# Altium schematic symbol library UCP.SchLib: 378 symbols (part 6 of 14)
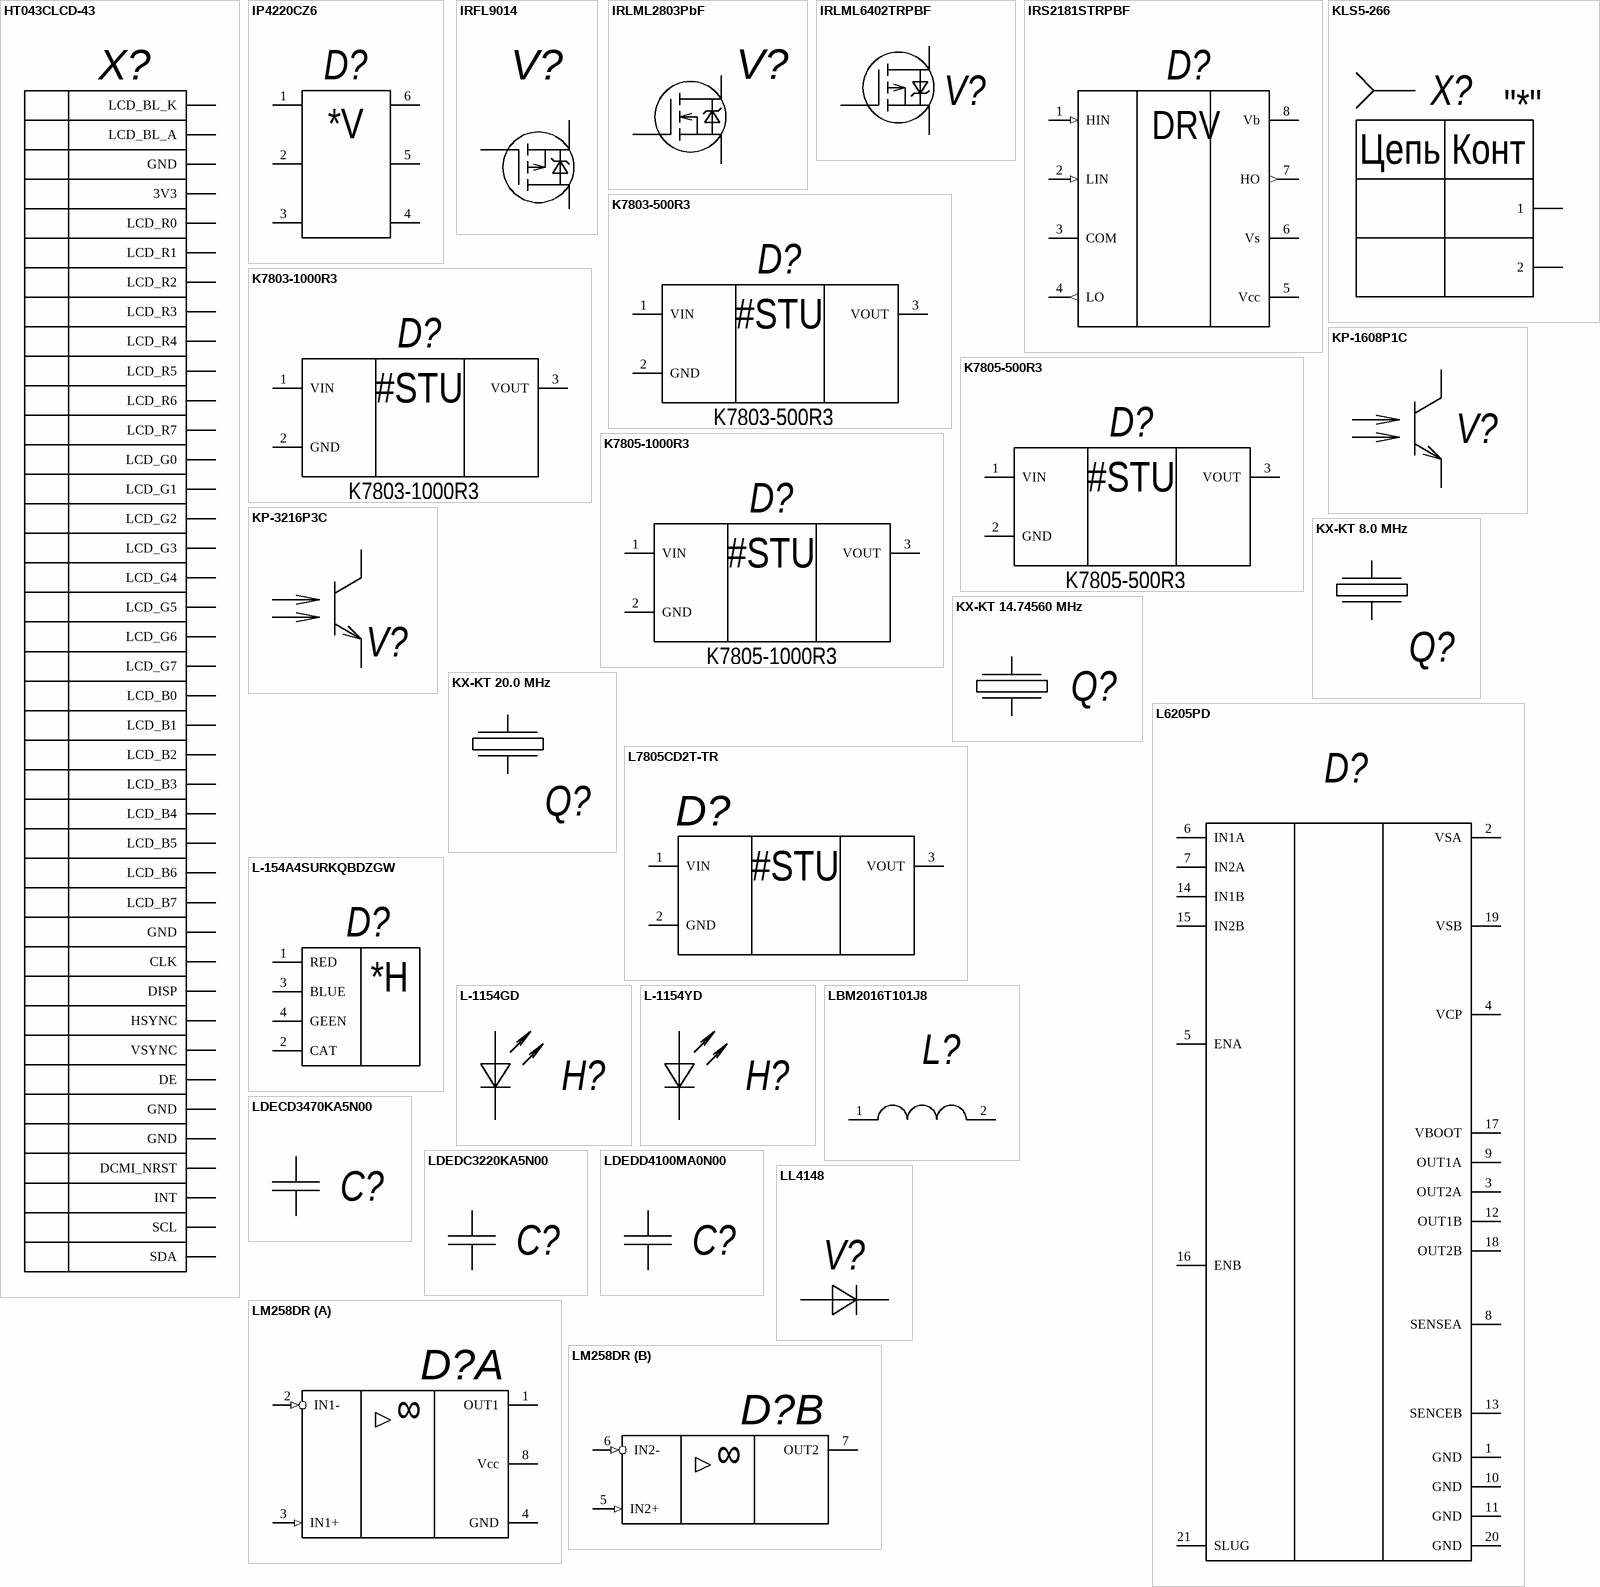
[diagram p29: symbols HT043CLCD-43 to LM258DR]

## IP4220CZ6
designator D?, comment IP4220CZ6,125  (value not drawn)
Dual USB 2.0 integrated ESD protection; Type: Микросхема; Value: IP4220; Supplier 1: Digi-Key; Supplier Part Number 1: 1727-3578-1-ND; Case/Package: SOT-23-6; Mount: SMT
footprint SOP6P95_290X275X110L40X32N (Small Outline Pkg (SOP), 0.95 mm pitch; 6 pin, 2.90 mm L X 1.50 mm W X 1.10 mm H body)
pins: 1 R1, 2 R2, 3 R3, 4 R4, 5 R5, 6 R6
text: *V

## IRFL9014
designator V?  (value not drawn)
Trans MOSFET P-CH 60V 1.8A 4-Pin(3+Tab) SOT-223 T/R; Manufacturer 1: Vishay Siliconix; Manufacturer Part Number 1: IRFL9014TRPBF; Power Dissipation: 2W; Rise Time: 63ns; Drain to Source Breakdown Voltage: -60V; Rds On Max: 500mR; Input Capacitance: 270pF; Gate to Source Voltage (Vgs): 20V; Fall Time: 31ns; Turn-Off Delay Time: 9.6ns; Number of Elements: 1; Turn-On Delay Time: 11ns; Threshold Voltage: -2V; Supplier 1: Digi-Key; RoHS: Yes; Category: MOSFETs; Stock 1: 12; Pricing 1: 1=1,01000, 10=0,89000, 100=0,68210, 500=0,53922, 1000=0,43138 (USD); Mount: SMT; Case/Package: SOT-223; Number of Pins: 4; Weight: 0.008826oz; Min Operating Temperature: -55°C; Max Operating Temperature: 150°C; Packaging: Tape and Reel; Continuous Drain Current (ID): 1.8A; Drain to Source Voltage (Vdss): 60V; Max Power Dissipation: 2W; Package Quantity: 2500; Drain to Source Resistance: 500mR; Number of Channels: 1; On-State Resistance: 500mR; Length: 6.7mm; Width: 3.7mm; Height: 1.45mm; Radiation Hardening: No; Lead Free: Lead Free; REACH SVHC: Unknown; ComponentLink1URL: https://datasheet.ciiva.com/932/sihfl901-932465.pdf?src-supplier=Digi-Key; ComponentLink1Description: https://datasheet.ciiva.com/932/sihfl901-932465.pdf?src-supplier=Digi-Key; ComponentLink2URL: https://datasheet.ciiva.com/4439/sihfl901-107496-4439233.pdf?src-supplier=Mouser; ComponentLink2Description: https://datasheet.ciiva.com/4439/sihfl901-107496-4439233.pdf?src-supplier=Mouser; ComponentLink3URL: https://datasheet.ciiva.com/22652/1724908-22652241.pdf?src-supplier=Element14; ComponentLink3Description: https://datasheet.ciiva.com/22652/1724908-22652241.pdf?src-supplier=Element14; ComponentLink4URL: https://datasheet.ciiva.com/17077/irfl9014trpbf-17077594.pdf?src-supplier=Allied+Electronics; ComponentLink4Description: https://datasheet.ciiva.com/17077/irfl9014trpbf-17077594.pdf?src-supplier=Allied+Electronics; ComponentLink5URL: https://datasheet.ciiva.com/26789/irfl9014trpbf-26789752.pdf?src-supplier=IIIC; ComponentLink5Description: https://datasheet.ciiva.com/26789/irfl9014trpbf-26789752.pdf?src-supplier=IIIC; ComponentLink6URL: https://datasheet.ciiva.com/932/sihfl901-932466.pdf?src-supplier=Digi-Key; ComponentLink6Description: https://datasheet.ciiva.com/932/sihfl901-932466.pdf?src-supplier=Digi-Key; ComponentLink7URL: https://datasheet.ciiva.com/932/sihfl901-932467.pdf?src-supplier=Digi-Key; ComponentLink7Description: https://datasheet.ciiva.com/932/sihfl901-932467.pdf?src-supplier=Digi-Key; ComponentLink8URL: https://datasheet.ciiva.com/26147/sihfl901-26147669.pdf?src-supplier=Avnet+Europe; ComponentLink8Description: https://datasheet.ciiva.com/26147/sihfl901-26147669.pdf?src-supplier=Avnet+Europe; ComponentLink9URL: https://datasheet.ciiva.com/8116/sihfl901-8116525.pdf?src-supplier=Avnet; ComponentLink9Description: https://datasheet.ciiva.com/8116/sihfl901-8116525.pdf?src-supplier=Avnet; ComponentLink10URL: https://datasheet.ciiva.com/16383/sihfl901-16383149.pdf?src-supplier=Future+Electronics; ComponentLink10Description: https://datasheet.ciiva.com/16383/sihfl901-16383149.pdf?src-supplier=Future+Electronics; Supplier Part Number 1: IRFL9014PBFCT-ND; Type: Транзистор; Value: IRFL9014
footprint SOT223-4P230_700X180L92X75N (Small Outline Transistor (SOT223), 2.30 mm pitch; 4 pin, 6.50 mm L X 3.50 mm W X 1.80 mm H body)
pins: 1 G, 2 D, 3 S, 4 D

## IRLML2803PbF
designator V?  (value not drawn)
Trans Mosfet P-ch 30V 1.1A 3-PIN SOT-23 T/r / Mosfet P-ch 30V 1.1A SSOT3; Manufacturer 1: ON Semiconductor / Fairchild; Manufacturer Part Number 1: NDS356AP; Max Power Dissipation: 460mW; Power Dissipation: 500mW; Nominal Vgs: -2V; Rds On Max: 200mR; Input Capacitance: 280pF; Rise Time: 17ns; Dual Supply Voltage: -30V; Turn-Off Delay Time: 53ns; Turn-On Delay Time: 8ns; Number of Elements: 1; Element Configuration: Single; Gate to Source Voltage (Vgs): 20V; On-State Resistance: 300mR; Current Rating: -1.1A; Supplier 1: Newark; RoHS: Yes; Category: MOSFETs; Stock 1: 56; Pricing 1: 1=0,68800, 10=0,58900, 100=0,43900, 500=0,34500 (USD); Mount: SMT; Case/Package: SOT-23-3; Number of Pins: 3; Weight: 0.03g; Min Operating Temperature: -55°C; Max Operating Temperature: 150°C; Drain to Source Voltage (Vdss): 30V; Continuous Drain Current (ID): 1.1A; Packaging: Tape and Reel; Package Quantity: 1; Fall Time: 17ns; Drain to Source Resistance: 200mR; Drain to Source Breakdown Voltage: -30V; Termination: SMD/SMT; Voltage Rating (DC): -30V; Width: 3.05mm; Radiation Hardening: No; REACH SVHC: No SVHC; RoHS Compliant: Yes; Lead Free: Lead Free; ComponentLink1URL: https://datasheet.ciiva.com/34301/1031124-34301896.pdf?src-supplier=Jameco; ComponentLink1Description: https://datasheet.ciiva.com/34301/1031124-34301896.pdf?src-supplier=Jameco; ComponentLink2URL: https://datasheet.ciiva.com/34301/1031167-34301897.pdf?src-supplier=Jameco; ComponentLink2Description: https://datasheet.ciiva.com/34301/1031167-34301897.pdf?src-supplier=Jameco; ComponentLink3URL: https://datasheet.ciiva.com/6383/nds356ap-6383345.pdf?src-supplier=Digi-Key; ComponentLink3Description: https://datasheet.ciiva.com/6383/nds356ap-6383345.pdf?src-supplier=Digi-Key; ComponentLink4URL: https://datasheet.ciiva.com/11176/nds356ap-11176040.pdf?src-supplier=Avnet; ComponentLink4Description: https://datasheet.ciiva.com/11176/nds356ap-11176040.pdf?src-supplier=Avnet; ComponentLink5URL: https://datasheet.ciiva.com/26140/nds356ap-26140220.pdf?src-supplier=Avnet+Europe; ComponentLink5Description: https://datasheet.ciiva.com/26140/nds356ap-26140220.pdf?src-supplier=Avnet+Europe; ComponentLink6URL: https://datasheet.ciiva.com/6383/nds356ap-6383349.pdf?src-supplier=Digi-Key; ComponentLink6Description: https://datasheet.ciiva.com/6383/nds356ap-6383349.pdf?src-supplier=Digi-Key; ComponentLink7URL: https://datasheet.ciiva.com/6383/nds356ap-6383351.pdf?src-supplier=Digi-Key; ComponentLink7Description: https://datasheet.ciiva.com/6383/nds356ap-6383351.pdf?src-supplier=Digi-Key; Type: Транзистор; Value: IRLML2803
footprint SOT23-3P95_240X110L25X60N (Small Outline Transistor (SOT23), 0.95 mm pitch; 3 pin, 2.90 mm L X 1.30 mm W X 1.10 mm H body)
footprint SOT23-3P95_240X110L30X43N (Small Outline Transistor (SOT23), 0.95 mm pitch; 3 pin, 2.90 mm L X 1.30 mm W X 1.10 mm H body)
pins: 1 G, 2 S, 3 D

## IRLML6402TRPBF
designator V?  (value not drawn)
P-Channel MOSFET; Supplier 1: RSComponents; Supplier Part Number 1: 301322; Case/Package: SOT-23-3; Mount: SMT; Type: Транзистор; Value: IRLML6402
footprint SOT23-3P95_240X110L25X60N (Small Outline Transistor (SOT23), 0.95 mm pitch; 3 pin, 2.90 mm L X 1.30 mm W X 1.10 mm H body)
footprint SOT23-3P95_240X110L30X43N (Small Outline Transistor (SOT23), 0.95 mm pitch; 3 pin, 2.90 mm L X 1.30 mm W X 1.10 mm H body)
pins: 1 G, 2 S, 3 D

## IRS2181STRPBF
designator D?  (value not drawn)
INTERNATIONAL RECTIFIER   IRS2181STRPBF   MOSFET DRIVER, HIGH/LOW-SIDE, SOIC-8; Number of Outputs: 2; Max Supply Voltage: 20V; Min Supply Voltage: 10V; Max Power Dissipation: 625mW; Turn-On Delay Time: 35ns; Propagation Delay: 330ns; Rise Time: 60ns; Max Output Current: 2.3A; Output Current: 1.9A; Max Supply Current: 240uA; Type: Микросхема; Supplier 1: Allied Electronics; Manufacturer 1: International Rectifier; Manufacturer Part Number 1: IRS2181STRPBF; RoHS: Yes; Category: Gate Drivers; Mount: SMT; Case/Package: SOIC-8-150; Number of Pins: 8; Weight: 0.019048oz; Min Operating Temperature: -40°C; Max Operating Temperature: 125°C; Package Quantity: 1; Packaging: Tape and Reel; Number of Drivers: 2; Fall Time: 35ns; Turn-Off Delay Time: 35ns; Power Dissipation: 625mW; Series: -; Operating Supply Current: 240uA; Output Voltage: 10V; Radiation Hardening: No; Lead Free: Lead Free; RoHS Compliant: Yes; REACH SVHC: No SVHC; ComponentLink1URL: https://datasheet.ciiva.com/15110/getdatasheetpartid-224396-15110064.pdf?src-supplier=Verical; ComponentLink1Description: https://datasheet.ciiva.com/15110/getdatasheetpartid-224396-15110064.pdf?src-supplier=Verical; ComponentLink2URL: https://datasheet.ciiva.com/16219/irs2181-16219484.pdf?src-supplier=Future+Electronics; ComponentLink2Description: https://datasheet.ciiva.com/16219/irs2181-16219484.pdf?src-supplier=Future+Electronics; Supplier Part Number 1: 70019117; Value: IRS2181
footprint SOIC8P127_490X600X175L83X42N (Small Outline IC (SOIC), 1.27 mm pitch; 8 pin, 4.905 mm L X 3.90 mm W X 1.75 mm H body)
footprint SOIC8P127_490X600X175L65X42N (Small Outline IC (SOIC), 1.27 mm pitch; 8 pin, 4.905 mm L X 3.90 mm W X 1.75 mm H body)
pins: 1 HIN (in) "Logic input for high-side gate driver output (HO), in phase", 2 LIN (in) "Logic input for low-side gate driver output (LO), in phase", 3 COM (power) "Low-side return", 4 LO (out) "Low-side gate drive output", 5 Vcc (power) "Low-side and logic fixed supply", 6 Vs "High-side floating supply return", 7 HO (out) "High-side gate drive output", 8 Vb "High-side floating supply"
text: DRV

## K7803-500R3
designator D?
Voltage Regulators - Switching Vout = 3.3V Iout = 500mA / Vin = 6-36V; Manufacturer 1: MORNSUN; Type: Микросхема; Value: K7803; Supplier 1: Digi-Key; Supplier Part Number 1: 2725-K7803-500R3-ND; Manufacturer Part Number 1: K7803-500R3; RoHS: Yes; Category: Board Mount Modules; Stock 1: 40434; Pricing 1: 1=2,26000, 5=2,22800, 10=2,19400, 25=2,13760, 50=2,07000, 100=2,01380, 250=1,95752, 500=1,81126 (USD); RoHS Compliant: Yes; Case/Package: SIP-3; Mount: THT
footprint MORNSUN_K78XX-500R3 (3 pin, L = 11.60 mm, W = 7.55mm, H = 10.16 mm)
pins: 1 VIN (power) "Input voltage pin for the regulator", 2 GND (power), 3 VOUT (power) "Output voltage pin for the regulator"
text: #STU

## K7803-1000R3
designator D?
Voltage Regulators - Switching Vout = 3.3V Iout = 1000mA / Vin = 6-36V; Manufacturer 1: MORNSUN; Type: Микросхема; Value: K7803; Supplier 1: RSComponents; Supplier Part Number 1: 1934012; Manufacturer Part Number 1: K7803-1000R3; RoHS: Yes; Category: Voltage Regulators - Switching; RoHS Compliant: Yes; Case/Package: SIP-3; Mount: THT
footprint MORNSUN_K78XX-1000R3 (3 pin, L = 11.50 mm, W = 9.00 mm, H = 17.50 mm)
pins: 1 VIN (power) "Input voltage pin for the regulator", 2 GND (power), 3 VOUT (power) "Output voltage pin for the regulator"
text: #STU

## K7805-500R3
designator D?
Voltage Regulators - Switching Vout = 5.0V Iout = 500mA / Vin = 6-36V; Manufacturer 1: MORNSUN; Type: Микросхема; Value: K7806; Supplier 1: Digi-Key; Supplier Part Number 1: 2725-K7805-500R3-ND; Manufacturer Part Number 1: K7805-500R3; RoHS: Yes; Category: Board Mount Modules; Stock 1: 67341; Pricing 1: 1=2,26000, 5=2,22800, 10=2,19400, 25=2,13760, 50=2,07000, 100=2,01380, 250=1,95752, 500=1,81126 (USD); RoHS Compliant: Yes; Case/Package: SIP-3; Mount: THT
footprint MORNSUN_K78XX-500R3 (3 pin, L = 11.60 mm, W = 7.55mm, H = 10.16 mm)
pins: 1 VIN (power) "Input voltage pin for the regulator", 2 GND (power), 3 VOUT (power) "Output voltage pin for the regulator"
text: #STU

## K7805-1000R3
designator D?
Voltage Regulators - Switching Vout = 5V Iout = 1000mA / Vin = 6-36V; Manufacturer 1: MORNSUN; Type: Микросхема; Value: K7804; Supplier 1: RSComponents; Supplier Part Number 1: 1934014; Manufacturer Part Number 1: K7805-1000R3; RoHS: Yes; Category: Voltage Regulators - Switching; RoHS Compliant: Yes; Case/Package: SIP-3; Mount: THT
footprint MORNSUN_K78XX-1000R3 (3 pin, L = 11.50 mm, W = 9.00 mm, H = 17.50 mm)
pins: 1 VIN (power) "Input voltage pin for the regulator", 2 GND (power), 3 VOUT (power) "Output voltage pin for the regulator"
text: #STU

## KLS5-266
designator X?  Marck-2: "*"  (hidden comment: KLS5-266)
PCB Fuse Clip For Fuse 5.2×20mm; Marck-1: *; Supplier 1: Digi-Key; Supplier Part Number 1: 486-2019-ND; Case/Package: DIP-2; Mount: THT; Type: 0; Value: KLS5-266
footprint ZH266
pins: 1, 2
text: Цепь; Конт

## KP-1608P1C
designator V?  (value not drawn)
Описание свойств компонента; Case/Package: 0805; Mount: SMT; Type: Фототранзистор; Value: 1608P1C
footprint KP-1608P1C (LED, Chip; 2.00 mm L X 1.25 mm W X 1.10 mm H body)
pins: 1 E, 2 C

## KP-3216P3C
designator V?  (value not drawn)
KINGBRIGHT         KP-3216P3C            PHOTOTRANSISTOR, 1206, 940NM; Viewing Angle: 120°; Polarity: NPN; Supplier 1: Newark; Supplier 2: Farnell; Supplier Part Number 1: 66W1934; Supplier Part Number 2: 2290437; Manufacturer 1: Kingbright; Manufacturer Part Number 1: KP-3216P3C; RoHS: Yes; Category: Uncategorized; Stock 1: 562; Pricing 1: 5=0,59700, 10=0,42200, 100=0,25100, 500=0,19300, 1000=0,15600, 2500=0,13700, 10000=0,13200, 25000=0,11500 (USD); Case/Package: 1206; Number of Pins: 2; Wavelength: 940nm; REACH SVHC: No SVHC; RoHS Compliant: Yes; ComponentLink1URL: https://datasheet.ciiva.com/22662/1683586-22662764.pdf?src-supplier=Element14; ComponentLink1Description: https://datasheet.ciiva.com/22662/1683586-22662764.pdf?src-supplier=Element14; Mount: SMT; Type: Фототранзистор; Value: 3216P3C
footprint KP-3216P3C (Phototransistor, Chip; 3.10 mm L X 1.60 mm W X 1.1 mm H body)
pins: 1 E, 2 C

## KX-KT 8.0 MHz
designator Q?, comment 12.87885  (value not drawn)
Quartz Crystal; Type: Резонатор кварцевый; Value: 8.0MHz; Supplier 1: Newark; Supplier Part Number 1: 56AC7469; Case/Package: HC-49S (SMD-2); Mount: SMT
footprint XTAL1140X450X420D1270L424X94N (Crystal; 11.40 mm L X 4.50 mm W X 4.20 mm H body)
pins: 1, 2

## KX-KT 14.74560 MHz
designator Q?  (value not drawn)
Quartz Crystal; Type: Резонатор кварцевый; Supplier 1: Digi-Key; Supplier Part Number 1: 535-10218-1-ND; Case/Package: HC-49S (SMD-2); Mount: SMT; Value: 14.74560MHz
footprint XTAL1140X450X420D1270L424X94N (Crystal; 11.40 mm L X 4.50 mm W X 4.20 mm H body)
pins: 1, 2

## KX-KT 20.0 MHz
designator Q?, comment 12.88107  (value not drawn)
Quartz Crystal; Type: Резонатор кварцевый; Value: 20.0MHz; Supplier 1: Digi-Key; Supplier Part Number 1: 535-10860-1-ND; Case/Package: HC-49S (SMD-2); Mount: SMT
footprint XTAL1140X450X420D1270L424X94N (Crystal; 11.40 mm L X 4.50 mm W X 4.20 mm H body)
pins: 1, 2

## L6205PD
designator D?  (value not drawn)
Full Bridge Motor Driver 48V 20-Pin PowerSO Tube / IC MOTOR DRIVER PAR 20POWERSO; Manufacturer 1: STMicroelectronics; Min Supply Voltage: 8V; Max Supply Voltage: 52V; Number of Outputs: 4; Output Current: 2.8A; Max Output Current: 5.6A; On-State Resistance: 300mR; Operating Supply Current: 10mA; Switching Frequency: 100kHz; Number of Channels: 2; Motor Type: Brushed; Rise Time: 250ns; Release Time: 550ns; Type: Микросхема; Value: L6205; Supplier 1: RSComponents; Supplier Part Number 1: 7140644; Manufacturer Part Number 1: L6205PD; RoHS: Yes; Category: Motor Drivers; Stock 1: 7; Pricing 1: 1=11,39100, 10=10,31500, 25=9,84500, 100=8,15000, 250=7,43700 (USD); Mount: SMT; Case/Package: PowerSO-20; Number of Pins: 20; Min Operating Temperature: -40°C; Max Operating Temperature: 150°C; Operating Supply Voltage: 48V; Packaging: Rail/Tube; Package Quantity: 31; Output Current per Channel: 2.8A; Max Collector Current: 2.8A; Collector Emitter Voltage (VCEO): 52V; Series: -; Output Voltage: 52V; Length: 16mm; Width: 11.1mm; Height: 3.3mm; Radiation Hardening: No; REACH SVHC: No SVHC; Lead Free: Lead Free; RoHS Compliant: Yes; ComponentLink1URL: https://datasheet.ciiva.com/15109/getdatasheetpartid-144488-15109394.pdf?src-supplier=Verical; ComponentLink1Description: https://datasheet.ciiva.com/15109/getdatasheetpartid-144488-15109394.pdf?src-supplier=Verical; ComponentLink2URL: https://datasheet.ciiva.com/14121/pgl6205-data-e-14121341.pdf?src-supplier=Distrelec; ComponentLink2Description: https://datasheet.ciiva.com/14121/pgl6205-data-e-14121341.pdf?src-supplier=Distrelec; ComponentLink3URL: https://datasheet.ciiva.com/26880/l6205pd-26880193.pdf?src-supplier=IIIC; ComponentLink3Description: https://datasheet.ciiva.com/26880/l6205pd-26880193.pdf?src-supplier=IIIC; ComponentLink4URL: https://datasheet.ciiva.com/1957/cd00002345-1957107.pdf?src-supplier=Digi-Key; ComponentLink4Description: https://datasheet.ciiva.com/1957/cd00002345-1957107.pdf?src-supplier=Digi-Key; ComponentLink5URL: https://datasheet.ciiva.com/4895/cd00002345-4895884.pdf?src-supplier=Mouser; ComponentLink5Description: https://datasheet.ciiva.com/4895/cd00002345-4895884.pdf?src-supplier=Mouser; ComponentLink6URL: https://datasheet.ciiva.com/16375/cd00002345-16375548.pdf?src-supplier=Future+Electronics; ComponentLink6Description: https://datasheet.ciiva.com/16375/cd00002345-16375548.pdf?src-supplier=Future+Electronics; ComponentLink7URL: https://datasheet.ciiva.com/22628/1700279-22628893.pdf?src-supplier=Element14; ComponentLink7Description: https://datasheet.ciiva.com/22628/1700279-22628893.pdf?src-supplier=Element14; ComponentLink8URL: https://datasheet.ciiva.com/25904/cd00002345-25904718.pdf?src-supplier=Avnet+Europe; ComponentLink8Description: https://datasheet.ciiva.com/25904/cd00002345-25904718.pdf?src-supplier=Avnet+Europe
footprint PowerSO20 (Small Outline IC (SOIC), 1.27 mm pitch; 20 pin, 12.80 mm L X 7.50 mm W X 2.65 mm H body)
pins: 1 GND (power) "Назначение вывода", 2 VSA (power) "Назначение вывода", 3 OUT2A "Назначение вывода", 4 VCP "Назначение вывода", 5 ENA "Назначение вывода", 6 IN1A "Назначение вывода", 7 IN2A "Назначение вывода", 8 SENSEA "Назначение вывода", 9 OUT1A "Назначение вывода", 10 GND (power) "Назначение вывода", 11 GND (power) "Назначение вывода", 12 OUT1B "Назначение вывода", 13 SENCEB "Назначение вывода", 14 IN1B "Назначение вывода", 15 IN2B "Назначение вывода", 16 ENB "Назначение вывода", 17 VBOOT (power) "Назначение вывода", 18 OUT2B "Назначение вывода", 19 VSB "Назначение вывода", 20 GND "Назначение вывода", 21 SLUG "Назначение вывода"

## L7805CD2T-TR
designator D?  (value not drawn)
Standard Regulator Pos 5V 1.5A 3-Pin(2+Tab) D2PAK T/R / IC REG LDO 5V 1.5A D2PAK; Type: Микросхема; Value: 7805; Case/Package: TO-263; Mount: SMT
footprint DPAK3P508_1524X482L179X74T741X1041M_num_1 (D2PAK, 5.08 mm pitch; 3 pin, 9.015 mm L X 10.16 mm W X 4.83 mm H body)
pins: 1 VIN (power) "Input voltage pin for the regulator", 2 GND (power), 3 VOUT (power) "Output voltage pin for the regulator"
text: #STU

## L-154A4SURKQBDZGW
designator D?  (value not drawn)
RGB LED; Type: Светодиод; Value: L-154; Supplier 1: Newark; Supplier Part Number 1: 66W1973; Case/Package: DIP-4; Mount: THT
footprint L-154A4SURKQBDZGW
pins: 1 RED "Назначение вывода", 2 CAT "Назначение вывода", 3 BLUE "Назначение вывода", 4 GEEN "Назначение вывода"
text: *H

## L-1154GD
designator H?  (value not drawn)
LED Lamp 3mm Pure Green; Value: зелёный; Case/Package: DIP-2; Mount: THT; Type: Светодиод
footprint LEDRD254W52D400H1250 (Radial (LED); 2.54 mm C X 4.00 mm Dia X 12.50 mm H body)
pins: A, C

## L-1154YD
designator H?  (value not drawn)
LED Lamp 3mm Pure Yellow; Value: жёлтый; Case/Package: DIP-2; Mount: THT; Type: Светодиод
footprint LEDRD254W52D400H1250 (Radial (LED); 2.54 mm C X 4.00 mm Dia X 12.50 mm H body)
pins: A, C

## LBM2016T101J8
designator L?  (value not drawn)
Описание свойств компонента; Type: 0; Supplier 1: Mouser; Supplier Part Number 1: 963-LBM2016T101J8; Case/Package: 0806; Mount: SMT; Value: LBM2016
pins: 1 "Назначение вывода", 2 "Назначение вывода"

## LDECD3470KA5N00
designator C?  (value not drawn)
470 nF ±10% 50 Vdc  PEN Film Capacitor; Manufacturer 1: KEMET; Description 1: Cap Film 0.47uF 50V PEN 10% (6 X 5 X 2.4mm) Stacked 125C Automotive T/R; Dielectric Material: Polyester; Capacitance: 470nF; Voltage Rating: 50V; Voltage Rating (AC): 40V; Dissipation Factor: 0.8%; Life (Hours): 2000Hour; Type: Конденсатор; Value: 470n; ComponentLink1URL: https://datasheet.ciiva.com/17238/datasheetpn-dedc3220ka5n00-17238768.pdf?src-supplier=Avnet+Europe; ComponentLink1Description: https://datasheet.ciiva.com/17238/datasheetpn-dedc3220ka5n00-17238768.pdf?src-supplier=Avnet+Europe; ComponentLink2URL: https://datasheet.ciiva.com/46436/1848868-46436183.pdf?src-supplier=Element14; ComponentLink2Description: https://datasheet.ciiva.com/46436/1848868-46436183.pdf?src-supplier=Element14; Supplier 1: Newark; Supplier Part Number 1: 95M5290; Manufacturer Part Number 1: LDECD3470KA5N00; RoHS: Yes; Category: Film Capacitors; Stock 1: 2700; Pricing 1: 1=1,98000, 25=1,48000, 50=1,22000, 100=0,95100, 250=0,90200, 500=0,85200 (USD); Mount: SMT; Case/Package: 2220; Number of Pins: 2; Case Code (Metric): 5750; Case Code (Imperial): 2220; Min Operating Temperature: -55°C; Max Operating Temperature: 125°C; Tolerance: 10%; Package Quantity: 1; Voltage Rating (DC): 50V; Packaging: Tape and Reel; Termination: SMD/SMT; Series: LDE; Voltage: 50V; Construction: Flat; Length: 6mm; Width: 5.1mm; Height: 2.4mm; Depth: 5mm; Height - Seated (Max): 0.094inch; Radiation Hardening: No; RoHS Compliant: Yes; REACH SVHC: No SVHC; ComponentLink3URL: http://uk.rs-online.com/webdocs/13da/0900766b813da2dd.pdf?src-supplier=RSComponents; ComponentLink3Description: http://uk.rs-online.com/webdocs/13da/0900766b813da2dd.pdf?src-supplier=RSComponents; ComponentLink4URL: http://www.mouser.com/ds/2/212/KEM_F3078_LDE-1103670.pdf?src-supplier=Mouser; ComponentLink4Description: http://www.mouser.com/ds/2/212/KEM_F3078_LDE-1103670.pdf?src-supplier=Mouser; ComponentLink5URL: http://components.arrow.com/part/dataview/0323_04081861?src-supplier=Arrow+Europe; ComponentLink5Description: http://components.arrow.com/part/dataview/0323_04081861?src-supplier=Arrow+Europe; ComponentLink6URL: https://www.alliedelec.com/m/d/40677f2e966276fa94026d325366fb79.pdf?src-supplier=Allied+Electronics; ComponentLink6Description: https://www.alliedelec.com/m/d/40677f2e966276fa94026d325366fb79.pdf?src-supplier=Allied+Electronics; ComponentLink7URL: http://www.farnell.com/datasheets/1959647.pdf?src-supplier=Farnell; ComponentLink7Description: http://www.farnell.com/datasheets/1959647.pdf?src-supplier=Farnell; ComponentLink8URL: http://www.arcotronics.com/download/smd.php?id=1&src-supplier=Element14; ComponentLink8Description: http://www.arcotronics.com/download/smd.php?id=1&src-supplier=Element14; ComponentLink9URL: https://search.kemet.com/component-edge/download/specsheet/DECD3470KA5N00.pdf?src-supplier=Digi-Key; ComponentLink9Description: https://search.kemet.com/component-edge/download/specsheet/DECD3470KA5N00.pdf?src-supplier=Digi-Key; ComponentLink10URL: http://capacitoredge.kemet.com/capedge2/DataSheet?pn=LDECD3470KA5N00&src-supplier=Avnet+Europe; ComponentLink10Description: http://capacitoredge.kemet.com/capedge2/DataSheet?pn=LDECD3470KA5N00&src-supplier=Avnet+Europe; ComponentLink11URL: http://www.arcotronics.com/download/smd.php?id=1&src-supplier=Farnell; ComponentLink11Description: http://www.arcotronics.com/download/smd.php?id=1&src-supplier=Farnell; ComponentLink12URL: http://www.farnell.com/datasheets/1959647.pdf?src-supplier=Element14; ComponentLink12Description: http://www.farnell.com/datasheets/1959647.pdf?src-supplier=Element14; ComponentLink13URL: http://capacitoredge.kemet.com/capedge2/DataSheet?pn=LDECD3470KA5N00&src-supplier=Avnet; ComponentLink13Description: http://capacitoredge.kemet.com/capedge2/DataSheet?pn=LDECD3470KA5N00&src-supplier=Avnet; ComponentLink14URL: https://api.kemet.com/component-edge/download/datasheet/LDECD3470KA5N00.pdf?src-supplier=Digi-Key; ComponentLink14Description: https://api.kemet.com/component-edge/download/datasheet/LDECD3470KA5N00.pdf?src-supplier=Digi-Key
footprint CAPC600X500X240L50 (Capacitor, Chip; 6.00 mm L X 5.00 mm W X 2.4 mm H body)
footprint CAPC600X500X240L50_KEMET (Capacitor, Chip; 6.00 mm L X 5.00 mm W X 2.4 mm H body)
pins: 1, 2

## LDEDC3220KA5N00
designator C?  (value not drawn)
220 nF ±10% 63 Vdc  PEN Film Capacitor; Manufacturer 1: KEMET; Description 1: 220nF +/-10% 40 V ac; 63 V dc PEN Film Capacitor LDE; Dielectric Material: Polyethylene; Capacitance: 220nF; Voltage Rating: 63V; Voltage Rating (AC): 40V; Type: Конденсатор; Value: 220n; Supplier 1: Digi-Key; Supplier Part Number 1: 399-11780-1-ND; Manufacturer Part Number 1: LDEDC3220KA5N00; RoHS: Yes; Category: Film Capacitors; Stock 1: 7114; Pricing 1: 1=0,92000, 10=0,70000, 50=0,58140, 100=0,50070, 500=0,38766, 1000=0,33382 (USD); Mount: SMT; Case/Package: 1812; Number of Pins: 2; Case Code (Metric): 4532; Case Code (Imperial): 1812; Min Operating Temperature: -55°C; Max Operating Temperature: 125°C; Tolerance: 10%; Voltage Rating (DC): 63V; Packaging: Tape and Reel; Termination: SMD/SMT; Voltage: 63V; Features: High Temperature; Series: LDE; Construction: Flat; Length: 4.7mm; Width: 0.13inch; Height: 2.4mm; Depth: 3.3mm; Height - Seated (Max): 0.094inch; Radiation Hardening: No; REACH SVHC: No SVHC; RoHS Compliant: Yes; ComponentLink1URL: https://datasheet.ciiva.com/17238/datasheetpn-dedc3220ka5n00-17238768.pdf?src-supplier=Avnet+Europe; ComponentLink1Description: https://datasheet.ciiva.com/17238/datasheetpn-dedc3220ka5n00-17238768.pdf?src-supplier=Avnet+Europe; ComponentLink2URL: https://datasheet.ciiva.com/46436/1848868-46436183.pdf?src-supplier=Element14; ComponentLink2Description: https://datasheet.ciiva.com/46436/1848868-46436183.pdf?src-supplier=Element14
footprint CAPC475X330X240L50 (Capacitor, Chip; 2.00 mm L X 1.25 mm W X 0.95 mm H body)
pins: 1, 2

## LDEDD4100MA0N00
designator C?  (value not drawn)
1 uF ±20% 63 Vdc  PEN Film Capacitor; Manufacturer 1: KEMET; Description 1: Cap Film 1uF 63V PEN 20% (6 X 5 X 4.4mm) Stacked 125C Automotive T/R; Dielectric Material: Polyester; Capacitance: 1uF; Voltage Rating (AC): 40V; Voltage Rating (DC): 63V; Type: Конденсатор; Value: 1u; Supplier 1: Digi-Key; Supplier Part Number 1: 399-11781-1-ND; Manufacturer Part Number 1: LDEDD4100MA0N00; RoHS: Yes; Category: Film Capacitors; Stock 1: 2597; Pricing 1: 1=1,66000, 10=1,34300, 50=1,17220, 100=1,02560, 500=0,78144 (USD); Mount: SMT; Case/Package: 2220; Case Code (Metric): 5750; Case Code (Imperial): 2220; Min Operating Temperature: -55°C; Max Operating Temperature: 125°C; Tolerance: 20%; Packaging: Tape and Reel; Features: High Temperature; Length: 0.236inch; Width: 0.197inch; Height - Seated (Max): 0.173inch; Depth: 5mm; RoHS Compliant: Yes; ComponentLink1URL: http://components.arrow.com/part/dataview/0323_03825373?src-supplier=Arrow+Europe; ComponentLink1Description: http://components.arrow.com/part/dataview/0323_03825373?src-supplier=Arrow+Europe; ComponentLink2URL: http://www.kemet.com/docfinder?Partnumber=LDE&src-supplier=Digi-Key; ComponentLink2Description: http://www.kemet.com/docfinder?Partnumber=LDE&src-supplier=Digi-Key
footprint CAPC600X500X240L50 (Capacitor, Chip; 6.00 mm L X 5.00 mm W X 2.4 mm H body)
footprint CAPC600X500X440L50_KEMET (Capacitor, Chip; 6.00 mm L X 5.00 mm W X 4.4 mm H body)
pins: 1, 2

## LL4148
designator V?  (value not drawn)
Surface-Mount Schottky Barrier Rectifier; Value: 4148; Supplier 1: Digi-Key; Supplier Part Number 1: LL4148FSCT-ND; Case/Package: SOD-80; Mount: SMT; Type: Диод
footprint DIOMELF350X164L52N (Diode, Metal Electrode Leadless Face (MELF); 3.50 mm L X 1.645 mm Dia body)
pins: A, C

## LM258DR
designator D?  (value not drawn)
Dual standard, industrial-grade, operational amplifier 8-SOIC -25 to 85; Manufacturer 1: Texas Instruments; Bandwidth: 1MHz; Min Dual Supply Voltage: 3.5V; Max Dual Supply Voltage: 18V; Voltage Gain: 75.56dB; Dual Supply Voltage: 9V; Nominal Supply Current: 500uA; Common Mode Rejection Ratio: 80dB; Number of Channels: 2; Slew Rate: 3.5V/µs; Max I/O Voltage: 6mV; Input Offset Voltage (Vos): 3mV; Input Bias Current: 200pA; Operating Supply Current: 200uA; Output Current: 30mA; Min Supply Voltage: 3V; Amplifier Type: GENERAL PURPOSE; Supply Current: 1.2mA; Type: Микросхема; Value: LM258; Manufacturer Part Number 1: LM258DR; RoHS: Yes; Category: Amplifiers - Op Amps, Buffer, Instrumentation; Stock 1: 59536; Pricing 1: 2500=0,11900 (USD); Case/Package: SOIC-8-150; Number of Pins: 8; Min Operating Temperature: -40°C; Max Operating Temperature: 85°C; Unity Gain Bandwidth Product: 1MHz; Packaging: Rail/Tube; Package Quantity: 50; Nominal Gain Bandwidth Product: 1MHz; Gain Bandwidth Product: 1MHz; Number of Circuits: 2; Number of Elements: 2; Operating Supply Voltage: 18V; Number of Amplifiers: 2; Max Supply Current: 500uA; Length: 9.81mm; Width: 6.35mm; Height: 4.57mm; Radiation Hardening: No; Lead Free: Lead Free; RoHS Compliant: Yes; REACH SVHC: No SVHC; ComponentLink1URL: https://datasheet.ciiva.com/27051/1063193-27051334.pdf?src-supplier=Jameco; ComponentLink1Description: https://datasheet.ciiva.com/27051/1063193-27051334.pdf?src-supplier=Jameco; ComponentLink2URL: https://datasheet.ciiva.com/7738/1768032-7738657.pdf?src-supplier=Element14; ComponentLink2Description: https://datasheet.ciiva.com/7738/1768032-7738657.pdf?src-supplier=Element14; ComponentLink3URL: https://datasheet.ciiva.com/14151/tl06x-series-eng-tds-14151159.pdf?src-supplier=Distrelec; ComponentLink3Description: https://datasheet.ciiva.com/14151/tl06x-series-eng-tds-14151159.pdf?src-supplier=Distrelec; ComponentLink4URL: https://datasheet.ciiva.com/1797/tl062a-1797198.pdf?src-supplier=Digi-Key; ComponentLink4Description: https://datasheet.ciiva.com/1797/tl062a-1797198.pdf?src-supplier=Digi-Key; Manufacturer 2: Texas Instruments; Manufacturer Part Number 2: TL062ID; Stock 2: 9100; Pricing 2: 1=1,40000, 10=1,25400, 25=1,19000, 100=0,97760, 250=0,91388, 500=0,80762, 1000=0,70175 (USD); Contact Plating: Gold; Max Supply Voltage: 18V; ComponentLink5URL: https://datasheet.ciiva.com/15129/getdatasheetpartid-40375-15129693.pdf?src-supplier=Verical; ComponentLink5Description: https://datasheet.ciiva.com/15129/getdatasheetpartid-40375-15129693.pdf?src-supplier=Verical; ComponentLink6URL: https://datasheet.ciiva.com/1797/tl062a-1797276.pdf?src-supplier=Digi-Key; ComponentLink6Description: https://datasheet.ciiva.com/1797/tl062a-1797276.pdf?src-supplier=Digi-Key; ComponentLink7URL: https://datasheet.ciiva.com/7738/1634178-7738543.pdf?src-supplier=Element14; ComponentLink7Description: https://datasheet.ciiva.com/7738/1634178-7738543.pdf?src-supplier=Element14; ComponentLink8URL: https://datasheet.ciiva.com/2974/tl062-2974181.pdf?src-supplier=Avnet; ComponentLink8Description: https://datasheet.ciiva.com/2974/tl062-2974181.pdf?src-supplier=Avnet; ComponentLink9URL: https://datasheet.ciiva.com/48712/001011491-da-01-en-ic-opamp-jfet-1mhz-du-tl062id-soic-8-tid-48712330.pdf?src-supplier=Conrad; ComponentLink9Description: https://datasheet.ciiva.com/48712/001011491-da-01-en-ic-opamp-jfet-1mhz-du-tl062id-soic-8-tid-48712330.pdf?src-supplier=Conrad; Mount: SMT; Output Current per Channel: 30mA; Series: -; Technology: BIPOLAR; ComponentLink10URL: https://datasheet.ciiva.com/34302/1342934-34302235.pdf?src-supplier=Jameco; ComponentLink10Description: https://datasheet.ciiva.com/34302/1342934-34302235.pdf?src-supplier=Jameco; ComponentLink11URL: https://datasheet.ciiva.com/1795/lm258a-1795505.pdf?src-supplier=Digi-Key; ComponentLink11Description: https://datasheet.ciiva.com/1795/lm258a-1795505.pdf?src-supplier=Digi-Key; ComponentLink12URL: https://datasheet.ciiva.com/1795/lm258a-1795506.pdf?src-supplier=Digi-Key; ComponentLink12Description: https://datasheet.ciiva.com/1795/lm258a-1795506.pdf?src-supplier=Digi-Key; ComponentLink13URL: https://datasheet.ciiva.com/1795/lm258a-1795507.pdf?src-supplier=Digi-Key; ComponentLink13Description: https://datasheet.ciiva.com/1795/lm258a-1795507.pdf?src-supplier=Digi-Key; ComponentLink14URL: https://datasheet.ciiva.com/2973/lm358a-2973285.pdf?src-supplier=Avnet; ComponentLink14Description: https://datasheet.ciiva.com/2973/lm358a-2973285.pdf?src-supplier=Avnet; ComponentLink15URL: https://datasheet.ciiva.com/26223/lm358a-26223035.pdf?src-supplier=Avnet+Europe; ComponentLink15Description: https://datasheet.ciiva.com/26223/lm358a-26223035.pdf?src-supplier=Avnet+Europe; ComponentLink16URL: https://datasheet.ciiva.com/16464/lm358a-16464604.pdf?src-supplier=Avnet+Asia; ComponentLink16Description: https://datasheet.ciiva.com/16464/lm358a-16464604.pdf?src-supplier=Avnet+Asia; ComponentLink17URL: https://datasheet.ciiva.com/48711/001071481-da-01-en-ic-opamp-gp-700khz-du-lm258dr-soic-8-tid-48711227.pdf?src-supplier=Conrad; ComponentLink17Description: https://datasheet.ciiva.com/48711/001071481-da-01-en-ic-opamp-gp-700khz-du-lm258dr-soic-8-tid-48711227.pdf?src-supplier=Conrad; Supplier 1: Mouser; Supplier Part Number 1: 595-LM258DR
footprint SOIC8P127_490X600X175L83X42N (Small Outline IC (SOIC), 1.27 mm pitch; 8 pin, 4.905 mm L X 3.90 mm W X 1.75 mm H body)
footprint SOIC8P127_490X600X175L65X42N (Small Outline IC (SOIC), 1.27 mm pitch; 8 pin, 4.905 mm L X 3.90 mm W X 1.75 mm H body)
part A pins: 1 OUT1 (oc) "Выход 1", 2 IN1- (in), 3 IN1+ (in) "Назначение вывода", 4 GND (power), 8 Vcc (power) "Назначение вывода"
part B pins: 5 IN2+ (in) "Назначение вывода", 6 IN2- (in) "Назначение вывода", 7 OUT2 "Назначение вывода"
part A text: ∞
part B text: ∞

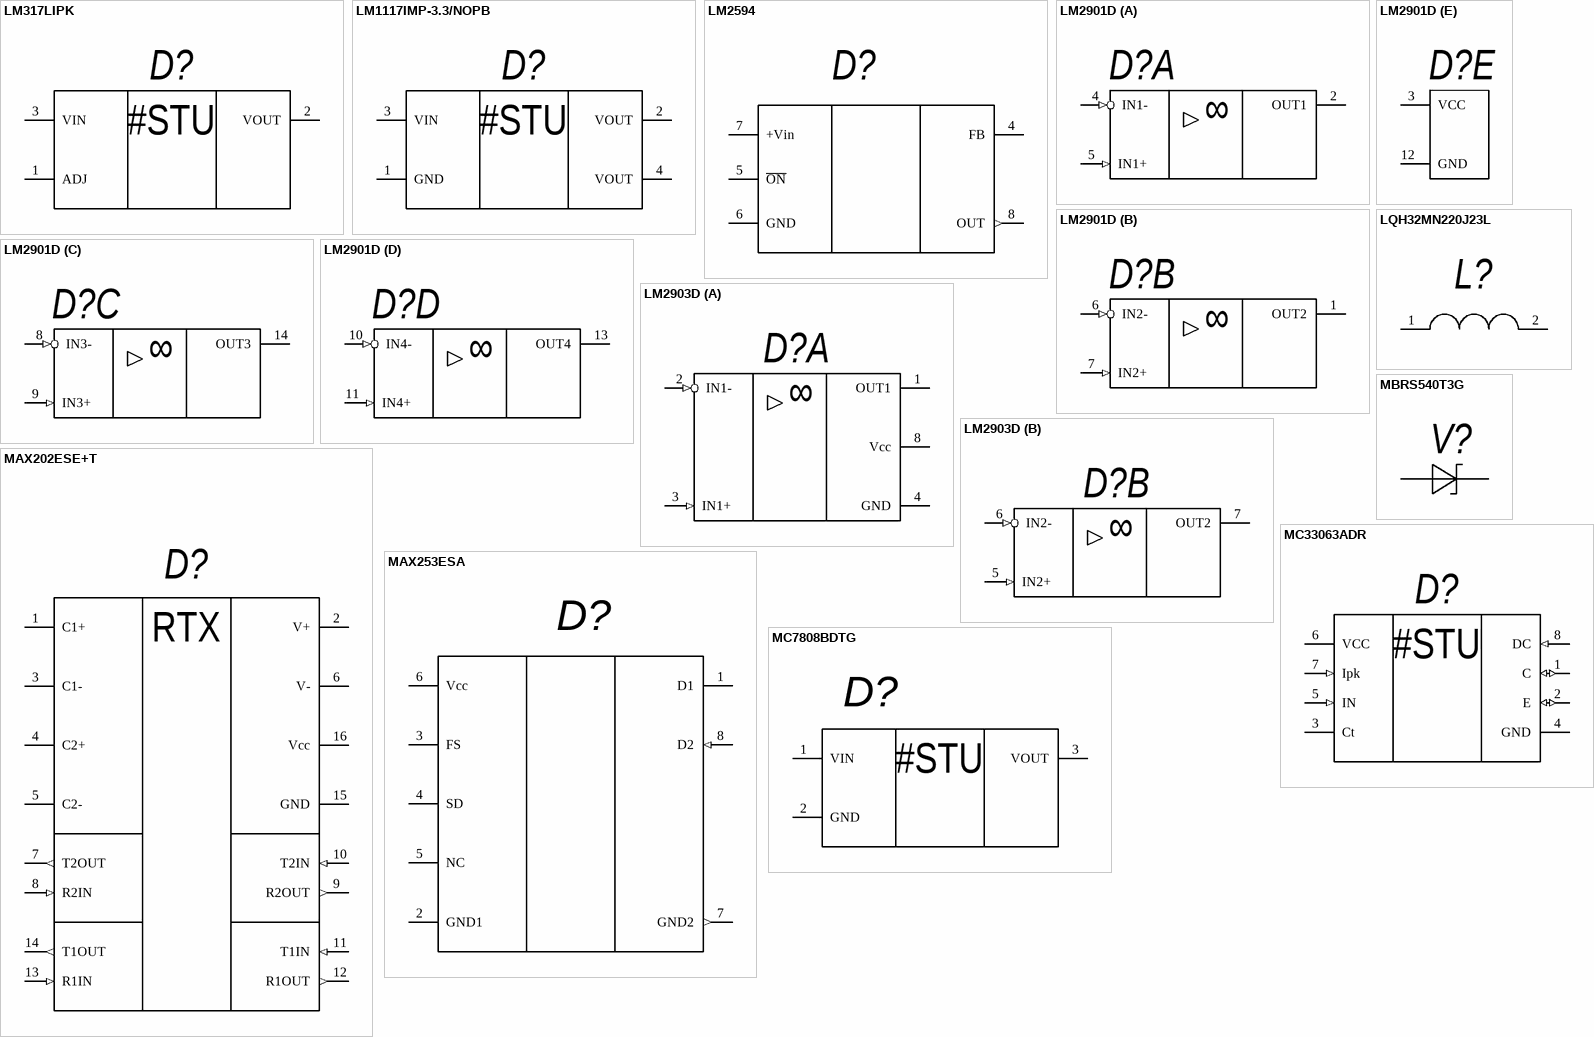
[diagram p15: symbols LM317LIPK to MC33063ADR]

## LM317LIPK
designator D?  (value not drawn)
100-mA, 35-V, adjustable linear voltage regulator 3-SOT-89 -40 to 125; Max Output Current: 100mA; Output Voltage: 32V; Number of Outputs: 1; Max Input Voltage: 35V; Min Input Voltage: 3.7V; Polarity: Positive; Reference Voltage: 1.3V; Power Supply Rejection Ratio (PSRR): 80dB; Quiescent Current: 1.5mA; Min Output Voltage: 1.2V; Type: Микросхема; Value: LM317; Manufacturer 4: Texas Instruments; Manufacturer Part Number 4: LM317LIPK; RoHS: Yes; Category: Voltage Regulators - Linear; Stock 4: 51928; Pricing 4: 1=0,74000, 10=0,65400, 25=0,61440, 100=0,50150, 250=0,46580, 500=0,39644 (USD); Mount: SMT; Case/Package: SOT-89; Number of Pins: 3; Weight: 0.004603oz; Contact Plating: Tin,Matte; Min Operating Temperature: -40°C; Max Operating Temperature: 125°C; Package Quantity: 1; Output Current: 100mA; Packaging: Tape and Reel; Number of Regulators: 1; Output Type: Adjustable; Min Current Limit: 100mA; Max Output Voltage: 32V; Length: 4.5mm; Width: 2.5mm; Height: 1.5mm; Radiation Hardening: No; Lead Free: Lead Free; RoHS Compliant: Yes; REACH SVHC: No SVHC; ComponentLink1URL: https://datasheet.ciiva.com/22710/1831060-22710928.pdf?src-supplier=Element14; ComponentLink1Description: https://datasheet.ciiva.com/22710/1831060-22710928.pdf?src-supplier=Element14; ComponentLink2URL: https://datasheet.ciiva.com/15111/getdatasheetpartid-49894-15111116.pdf?src-supplier=Verical; ComponentLink2Description: https://datasheet.ciiva.com/15111/getdatasheetpartid-49894-15111116.pdf?src-supplier=Verical; ComponentLink3URL: https://datasheet.ciiva.com/1512/1859385-1512034.pdf?src-supplier=Element14; ComponentLink3Description: https://datasheet.ciiva.com/1512/1859385-1512034.pdf?src-supplier=Element14; ComponentLink4URL: https://datasheet.ciiva.com/46386/1859385-46386791.pdf?src-supplier=Element14; ComponentLink4Description: https://datasheet.ciiva.com/46386/1859385-46386791.pdf?src-supplier=Element14; ComponentLink5URL: https://datasheet.ciiva.com/2042/lm317l-2042778.pdf?src-supplier=Digi-Key; ComponentLink5Description: https://datasheet.ciiva.com/2042/lm317l-2042778.pdf?src-supplier=Digi-Key; ComponentLink6URL: https://datasheet.ciiva.com/2042/lm317l-2042777.pdf?src-supplier=Digi-Key; ComponentLink6Description: https://datasheet.ciiva.com/2042/lm317l-2042777.pdf?src-supplier=Digi-Key; ComponentLink7URL: https://datasheet.ciiva.com/2042/lm317l-2042779.pdf?src-supplier=Digi-Key; ComponentLink7Description: https://datasheet.ciiva.com/2042/lm317l-2042779.pdf?src-supplier=Digi-Key; ComponentLink8URL: https://datasheet.ciiva.com/3223/lm317l-3223686.pdf?src-supplier=Avnet; ComponentLink8Description: https://datasheet.ciiva.com/3223/lm317l-3223686.pdf?src-supplier=Avnet; ComponentLink9URL: https://datasheet.ciiva.com/25974/lm317l-25974696.pdf?src-supplier=Avnet+Europe; ComponentLink9Description: https://datasheet.ciiva.com/25974/lm317l-25974696.pdf?src-supplier=Avnet+Europe; ComponentLink10URL: https://datasheet.ciiva.com/48475/lm317l-48475020.pdf?src-supplier=Avnet; ComponentLink10Description: https://datasheet.ciiva.com/48475/lm317l-48475020.pdf?src-supplier=Avnet; Supplier Part Number 4: 296-21742-1-ND
footprint SOT89-150P350X160-3N (SOT89, 3-Leads, Body 4,50x2,50mm, Pitch 1,50mm, Lead Span 3,5mm , IPC Medium Density)
pins: 1 ADJ, 2 VOUT (power) "Output voltage pin for the regulator", 3 VIN (power) "Input voltage pin for the regulator"
text: #STU

## LM1117IMP-3.3/NOPB
designator D?  (value not drawn)
LM1117 800-mA, Low-Dropout Linear Regulator; Manufacturer 1: Texas Instruments; Output Voltage: 3.3V; Number of Outputs: 1; Output Current: 800mA; Dropout Voltage: 1.2V; Max Input Voltage: 15V; Min Input Voltage: 2.6V; Max Supply Voltage: 10V; Min Supply Voltage: 4.75V; Polarity: Positive; Quiescent Current: 15mA; Accuracy: 1%; Current Rating: 800A; Output Type: Fixed; Type: Микросхема; Supplier 1: Mouser; Supplier Part Number 1: 926-LM1117IMP3.3NOPB; Manufacturer Part Number 1: LM1117IMP-3.3/NOPB; RoHS: Yes; Category: Voltage Regulators - Linear; Pricing 1: 1=1,41000, 10=1,27000, 25=1,20000, 50=1,20000, 100=0,98500, 250=0,92100, 500=0,81400, 1000=0,64200, 10000=0,64200 (USD); Mount: SMT; Case/Package: SOT-223; Number of Pins: 4; Min Operating Temperature: -40°C; Max Operating Temperature: 125°C; Packaging: Tape and Reel; Max Output Current: 800mA; Nominal Output Voltage: 3.3V; Termination: SMD/SMT; Output Voltage Accuracy: 1%; Number of Regulators: 1; Min Current Limit: 800mA; Package Quantity: 1000; Length: 6.5mm; Width: 3.56mm; Height: 1.6mm; Radiation Hardening: No; REACH SVHC: No SVHC; Lead Free: Lead Free; RoHS Compliant: Yes; ComponentLink1URL: https://datasheet.ciiva.com/27051/1281318-27051810.pdf?src-supplier=Jameco; ComponentLink1Description: https://datasheet.ciiva.com/27051/1281318-27051810.pdf?src-supplier=Jameco; ComponentLink2URL: https://datasheet.ciiva.com/8042/1670636-8042261.pdf?src-supplier=Element14; ComponentLink2Description: https://datasheet.ciiva.com/8042/1670636-8042261.pdf?src-supplier=Element14; ComponentLink3URL: https://datasheet.ciiva.com/1570/1849796-1570171.pdf?src-supplier=Farnell; ComponentLink3Description: https://datasheet.ciiva.com/1570/1849796-1570171.pdf?src-supplier=Farnell; ComponentLink4URL: https://datasheet.ciiva.com/14149/lm1117-eng-tds-14149980.pdf?src-supplier=Distrelec; ComponentLink4Description: https://datasheet.ciiva.com/14149/lm1117-eng-tds-14149980.pdf?src-supplier=Distrelec; ComponentLink5URL: https://datasheet.ciiva.com/46386/1882372-46386042.pdf?src-supplier=Element14; ComponentLink5Description: https://datasheet.ciiva.com/46386/1882372-46386042.pdf?src-supplier=Element14; ComponentLink6URL: https://datasheet.ciiva.com/3223/lm1117-n-3223515.pdf?src-supplier=Avnet; ComponentLink6Description: https://datasheet.ciiva.com/3223/lm1117-n-3223515.pdf?src-supplier=Avnet; ComponentLink7URL: https://datasheet.ciiva.com/6580/lm1117-n-6580030.pdf?src-supplier=Digi-Key; ComponentLink7Description: https://datasheet.ciiva.com/6580/lm1117-n-6580030.pdf?src-supplier=Digi-Key; ComponentLink8URL: https://datasheet.ciiva.com/6580/lm1117-n-6580026.pdf?src-supplier=Digi-Key; ComponentLink8Description: https://datasheet.ciiva.com/6580/lm1117-n-6580026.pdf?src-supplier=Digi-Key; Value: LM1117
footprint SOT223-4P230_700X180L92X75N (Small Outline Transistor (SOT223), 2.30 mm pitch; 4 pin, 6.50 mm L X 3.50 mm W X 1.80 mm H body)
pins: 1 GND (power), 2 VOUT (power) "Output voltage pin for the regulator", 3 VIN (power) "Input voltage pin for the regulator", 4 VOUT (power) "Output voltage pin for the regulator"
text: #STU

## LM2594
designator D?, comment LM2594DADJ  (value not drawn)
LM2594DADJR2G Switching Regulator 500mAAdjustable; 1.23 to 37 V; 8-Pin SOIC; Max Input Voltage: 40V; Output Voltage: 37V; Output Current: 500mA; Number of Outputs: 1; Min Input Voltage: 4.5V; Switching Frequency: 150kHz; Efficiency: 80%; Synchronous Rectifier: No; Min Output Voltage: 1.23V; Switching Frequency-Max: 165kHz; Type: Микросхема; Value: LM2594; Supplier 1: Digi-Key; Supplier Part Number 1: LM2594HVM-5.0/NOPB-ND; Supplier 2: Avnet; Supplier Part Number 2: LM2594DADJG; Supplier 3: Digi-Key; Supplier Part Number 3: LM2594DADJR2GOSDKR-ND; Manufacturer 3: ON Semiconductor; Manufacturer Part Number 3: LM2594DADJR2G; RoHS: Yes; Category: Voltage Regulators - Switching; Pricing 3: 1=2,19000, 10=1,97000, 25=1,85840, 100=1,58340, 250=1,48676, 500=1,30092, 1000=1,22728 (USD); Mount: SMT; Case/Package: SOIC-8-150; Number of Pins: 8; Min Operating Temperature: -40°C; Max Operating Temperature: 125°C; Packaging: Tape and Reel; Package Quantity: 1; Max Output Current: 500mA; Max Output Voltage: 37V; Output Type: Adjustable; Series: -; Length: 5mm; Width: 4mm; Height: 1.5mm; Radiation Hardening: No; REACH SVHC: No SVHC; Lead Free: Lead Free; Halogen Free: Halogen Free; RoHS Compliant: Yes; ComponentLink1URL: https://datasheet.ciiva.com/22630/1712843-22630290.pdf?src-supplier=Element14; ComponentLink1Description: https://datasheet.ciiva.com/22630/1712843-22630290.pdf?src-supplier=Element14; ComponentLink2URL: https://datasheet.ciiva.com/8270/lm2594-d-8270165.pdf?src-supplier=Avnet; ComponentLink2Description: https://datasheet.ciiva.com/8270/lm2594-d-8270165.pdf?src-supplier=Avnet; ComponentLink3URL: https://datasheet.ciiva.com/4905/lm2594-d-109427-4905126.pdf?src-supplier=Mouser; ComponentLink3Description: https://datasheet.ciiva.com/4905/lm2594-d-109427-4905126.pdf?src-supplier=Mouser; ComponentLink4URL: https://datasheet.ciiva.com/6607/lm2594-d-6607034.pdf?src-supplier=Digi-Key; ComponentLink4Description: https://datasheet.ciiva.com/6607/lm2594-d-6607034.pdf?src-supplier=Digi-Key; ComponentLink5URL: https://datasheet.ciiva.com/16456/lm2594-d-16456890.pdf?src-supplier=Future+Electronics; ComponentLink5Description: https://datasheet.ciiva.com/16456/lm2594-d-16456890.pdf?src-supplier=Future+Electronics; ComponentLink6URL: https://datasheet.ciiva.com/6607/lm2594-d-6607035.pdf?src-supplier=Digi-Key; ComponentLink6Description: https://datasheet.ciiva.com/6607/lm2594-d-6607035.pdf?src-supplier=Digi-Key; ComponentLink7URL: https://datasheet.ciiva.com/6607/lm2594-d-6607036.pdf?src-supplier=Digi-Key; ComponentLink7Description: https://datasheet.ciiva.com/6607/lm2594-d-6607036.pdf?src-supplier=Digi-Key; ComponentLink8URL: https://datasheet.ciiva.com/26106/lm2594-d-26106380.pdf?src-supplier=Avnet+Europe; ComponentLink8Description: https://datasheet.ciiva.com/26106/lm2594-d-26106380.pdf?src-supplier=Avnet+Europe
footprint SOIC8P127_490X600X175L83X42N (Small Outline IC (SOIC), 1.27 mm pitch; 8 pin, 4.905 mm L X 3.90 mm W X 1.75 mm H body)
footprint SOIC8P127_490X600X175L65X42N (Small Outline IC (SOIC), 1.27 mm pitch; 8 pin, 4.905 mm L X 3.90 mm W X 1.75 mm H body)
pins: 4 FB "Назначение вывода", 5 ~{ON} "GND", 6 GND (power), 7 +Vin (power), 8 OUT (out) "GND"

## LM2901D
designator D?  (value not drawn)
Single Supply Quad Comparators; Type: Микросхема; Value: 2901; Supplier 1: RSComponents; Supplier 2: Mouser; Case/Package: SOIC-14; Mount: SMT
footprint SOIC14P127_865X600X175L83X42N (Small Outline IC (SOIC), 1.27 mm pitch; 14 pin, 8.65 mm L X 3.90 mm W X 1.75 mm H body)
footprint SOIC14P127_865X600X175L65X42N (Small Outline IC (SOIC), 1.27 mm pitch; 14 pin, 8.65 mm L X 3.90 mm W X 1.75 mm H body)
part A pins: 2 OUT1 (oc) "Выход 1", 4 IN1- (in), 5 IN1+ (in) "Назначение вывода"
part B pins: 1 OUT2 "Назначение вывода", 6 IN2- (in) "Назначение вывода", 7 IN2+ (in) "Назначение вывода"
part C pins: 8 IN3- (in) "Назначение вывода", 9 IN3+ (in) "Назначение вывода", 14 OUT3 "Назначение вывода"
part D pins: 10 IN4- (in) "Назначение вывода", 11 IN4+ (in) "Назначение вывода", 13 OUT4 "Назначение вывода"
part E pins: 3 VCC (power) "Назначение вывода", 12 GND (power) "Назначение вывода"
part A text: ∞
part B text: ∞
part C text: ∞
part D text: ∞

## LM2903D
designator D?  (value not drawn)
Low-power dual voltage comparator; Type: Микросхема; Value: LM2903; Supplier 1: RSComponents; Supplier Part Number 1: 7140754; Case/Package: SOIC-8-150; Mount: SMT
footprint SOIC8P127_490X600X175L83X42N (Small Outline IC (SOIC), 1.27 mm pitch; 8 pin, 4.905 mm L X 3.90 mm W X 1.75 mm H body)
footprint SOIC8P127_490X600X175L65X42N (Small Outline IC (SOIC), 1.27 mm pitch; 8 pin, 4.905 mm L X 3.90 mm W X 1.75 mm H body)
part A pins: 1 OUT1 (oc) "Выход 1", 2 IN1- (in), 3 IN1+ (in) "Назначение вывода", 4 GND (power), 8 Vcc (power) "Назначение вывода"
part B pins: 5 IN2+ (in) "Назначение вывода", 6 IN2- (in) "Назначение вывода", 7 OUT2 "Назначение вывода"
part A text: ∞
part B text: ∞

## LQH32MN220J23L
designator L?, comment LQH2MCN220K02L  (value not drawn)
Chip Coils for DC-DC Converter Wire Wound Type / LQH32MN_23 Series 1210 (3225) 220 uH, 150 mA; Type: Катушка индуктивности; Value: 1210; Supplier 1: Digi-Key; Supplier Part Number 1: 490-4048-1-ND; Case/Package: SMD-2; Mount: SMT
footprint INDM320X250X220L90X200N (Inductor, Molded Body; 3.20 mm L X 2.50 mm W X 2.20 mm H body)
pins: 1 "Назначение вывода", 2 "Назначение вывода"

## MAX202ESE+T
designator D?  (value not drawn)
+5V, RS-232 Transceivers with 0.1μF External Capacitors; Type: Микросхема; Value: MAX202; Supplier 1: Digi-Key; Supplier Part Number 1: MAX202ESE+CT-ND; Case/Package: SOIC-16; Mount: SMT
footprint SOIC16P127_990X600X175L83X42N (Small Outline IC (SOIC), 1.27 mm pitch; 16 pin, 9.90 mm L X 3.90 mm W X 1.75 mm H body)
footprint SOIC16P127_990X600X175L65X42N (Small Outline IC (SOIC), 1.27 mm pitch; 16 pin, 9.90 mm L X 3.90 mm W X 1.75 mm H body)
pins: 1 C1+, 2 V+ "Выходной фильтрующий конденсатор", 3 C1- "Назначение вывода", 4 C2+ "Назначение вывода", 5 C2- "Назначение вывода", 6 V- "Выходной фильтрующий конденсатор", 7 T2OUT (out) "Выход RS-232 (Канал 2)", 8 R2IN (in) "Вход RS-232 (Канал 2)", 9 R2OUT (out) "Выход ТТЛ/КМОП (Канал 2)", 10 T2IN (in) "Вход ТТЛ/КМОП (Канал 2)", 11 T1IN (in) "Вход ТТЛ/КМОП (Канал 1)", 12 R1OUT (out) "Выход ТТЛ/КМОП (Канал 1)", 13 R1IN (in) "Вход RS-232 (Канал 1)", 14 T1OUT (out) "Выход RS-232 (Канал 1)", 15 GND (power) "Вывод питания (GND)", 16 Vcc (power) "Вывод питания (+5В)"
text: RTX

## MAX253ESA
designator D?  (value not drawn)
Transformer Dvr for Iso. RS-485/RS-232 I'face; Single Supply 5.0 or 3.3 V, SOIC8; Manufacturer 1: Maxim; Manufacturer Part Number 1: MAX253ESA+; Max Supply Voltage: 6V; Min Supply Voltage: 2.5V; Output Current: 1A; Nominal Supply Current: 450uA; Max Power Dissipation: 471mW; Number of Drivers: 1; Voltage: 5V; Interface: RS-232,RS-485; Type: Микросхема; Value: MAX253; RoHS: Yes; Category: Interface ICs; Stock 1: 2; Pricing 1: 1=5,70000, 10=5,11700, 25=4,83760, 100=4,19250, 250=3,97752, 500=3,56900, 1000=3,22500 (USD); Mount: SMT; Case/Package: SOIC-8-150; Number of Pins: 8; Contact Plating: Tin,Matte; Min Operating Temperature: -40°C; Max Operating Temperature: 85°C; Package Quantity: 100; Packaging: Rail/Tube; Series: -; Operating Supply Voltage: 5V; Supply Current: 450uA; Power Dissipation: 471mW; Length: 5mm; Width: 4mm; Height: 1.5mm; Radiation Hardening: No; Lead Free: Lead Free; RoHS Compliant: Yes; REACH SVHC: No SVHC; ComponentLink1URL: https://datasheet.ciiva.com/1503/4529-1503358.pdf?src-supplier=Element14; ComponentLink1Description: https://datasheet.ciiva.com/1503/4529-1503358.pdf?src-supplier=Element14; ComponentLink2URL: https://datasheet.ciiva.com/1713/max253-1713416.pdf?src-supplier=Digi-Key; ComponentLink2Description: https://datasheet.ciiva.com/1713/max253-1713416.pdf?src-supplier=Digi-Key; Supplier 1: Digi-Key; Supplier Part Number 1: MAX253ESA+-ND
footprint SOIC8P127_490X600X175L83X42N (Small Outline IC (SOIC), 1.27 mm pitch; 8 pin, 4.905 mm L X 3.90 mm W X 1.75 mm H body)
footprint SOIC8P127_490X600X175L65X42N (Small Outline IC (SOIC), 1.27 mm pitch; 8 pin, 4.905 mm L X 3.90 mm W X 1.75 mm H body)
pins: 1 D1, 2 GND1, 3 FS, 4 SD, 5 NC "Назначение вывода", 6 Vcc "Выходной фильтрующий конденсатор", 7 GND2 (out), 8 D2 (in)

## MBRS540T3G
designator V?  (value not drawn)
DIODE SCHOTTKY 40V 5A MELF; Manufacturer 1: Vishay Semiconductors; Manufacturer Part Number 1: VS-30BQ040HM3/9AT; Average Rectified Current: 3A; Mount: SMT; Case/Package: SMC; ComponentLink1URL: https://datasheet.ciiva.com/925/1n5817m-5818m-5819m-925412.pdf?src-supplier=Digi-Key; ComponentLink1Description: https://datasheet.ciiva.com/925/1n5817m-5818m-5819m-925412.pdf?src-supplier=Digi-Key; Type: Диод; Value: MBRS540; Supplier 1: Avnet; Supplier Part Number 1: VS-30BQ040HM3/9AT; RoHS 1: Yes; Category: Rectifier Diodes; Stock 1: 17500; Pricing 1: 3500=0,18375, 7000=0,18116, 14000=0,17857, 21000=0,17598, 28000=0,1721, 35000=0,16951, 350000=0,16693 (USD); Packaging: Bulk; Max Reverse Voltage (DC): 40V; Series: Automotive, AEC-Q101; RoHS Compliant: Yes; ComponentLink2URL: http://www.mouser.com/ds/2/427/vs-30bq040hm3-907579.pdf?src-supplier=Mouser; ComponentLink2Description: http://www.mouser.com/ds/2/427/vs-30bq040hm3-907579.pdf?src-supplier=Mouser; ComponentLink3URL: http://www.vishay.com/docs/94843/vs-30bq040hm3.pdf?src-supplier=Digi-Key; ComponentLink3Description: http://www.vishay.com/docs/94843/vs-30bq040hm3.pdf?src-supplier=Digi-Key
footprint DIOM794X590X262L114X305M (Diode, Molded Body; 6.855 mm L X 5.905 mm W X 2.62 mm H body)
pins: A, C

## MC7808BDTG
designator D?  (value not drawn)
Linear Voltage Regulator, 1 A, 5 to 24 V, Positive Vout: 8.0 V; TJ = -40°C to +125°C; Type: Транзистор; Value: 7808; Case/Package: TO-263; Mount: SMT
footprint DPAK3P508_1524X482L179X74T741X1041M_num_1 (D2PAK, 5.08 mm pitch; 3 pin, 9.015 mm L X 10.16 mm W X 4.83 mm H body)
pins: 1 VIN (power) "Input voltage pin for the regulator", 2 GND (power), 3 VOUT (power) "Output voltage pin for the regulator"
text: #STU